# Altium footprint library Altium_Box_Header_MPC3.PcbLib: 235 footprints (part 1 of 15)
Each footprint in its own frame and in the unit in brackets; x right, y up, seen from the top. Pads: shape width x height; smd on the part's side, far side on the other; paste and mask are expansions set on the pad; w line width, h text height; cw(c..) or ccw(c..) is an arc to the next point about the centre after c.
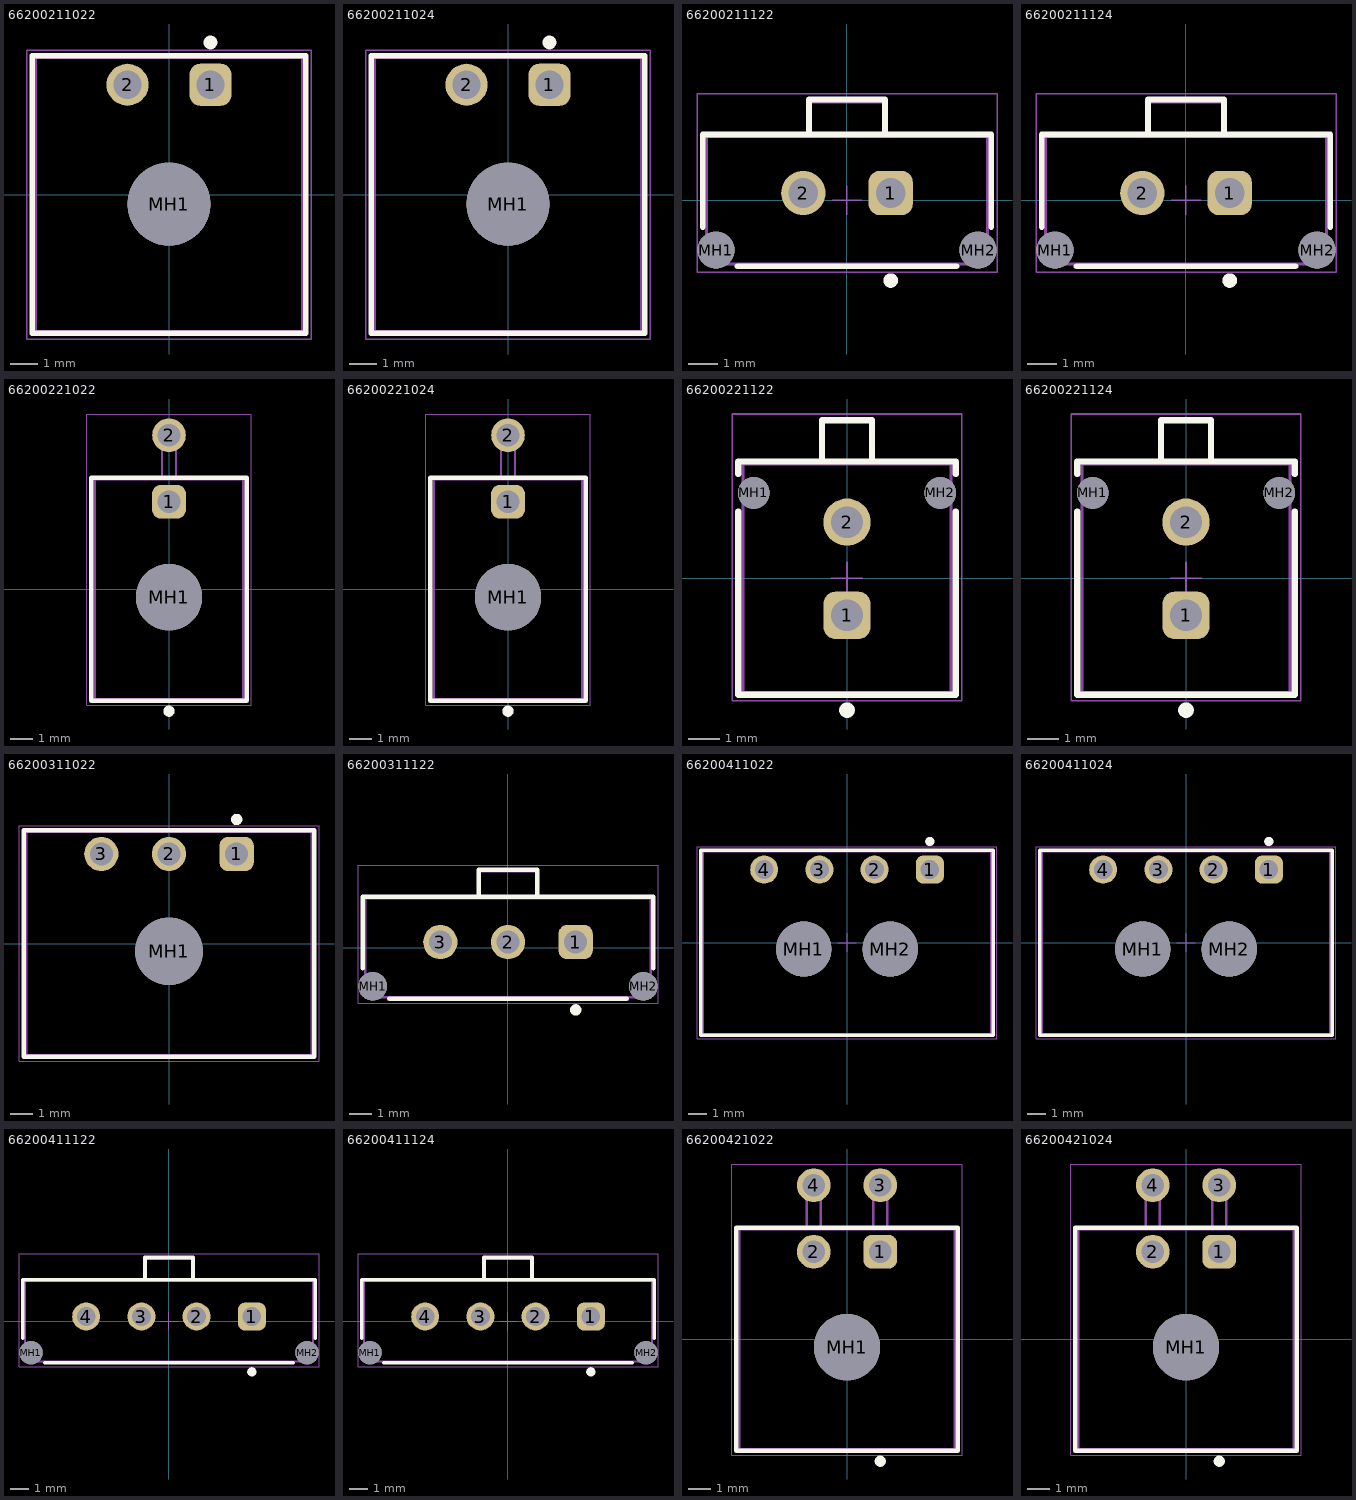
[diagram p0: the footprints below, top view; thin cyan lines are the x and y axes]

## 66200211022 [mm] "3.00mm Male Single Row Angled Header with Plastic Pegs, 2p"
height 5.07
pads (3):
  rrect50% 1.52x1.52 hole 1.02: 1(1.5,3.97)
  round 1.52 hole 1.02: 2(-1.5,3.97)
  round 3 hole 3 unplated: MH1(0,-0.35)
Top Overlay:
  circle w0.25: c1.5,5.5 r0.125
  lines w0.2: -4.95,-5.025 -4.95,5.025 4.95,5.025 4.95,-5.025 -4.95,-5.025
Top Designator:
  text ".Designator" at -7.498,-0.5 h1.5
Top Component Outline:
  lines w0.1: -4.825,-4.95 4.825,-4.95 4.825,4.95 -4.825,4.95 -4.825,-4.95
Top 3D Body:
  lines w0.1: -4.825,-4.95 4.825,-4.95 4.825,4.95 -4.825,4.95 -4.825,-4.95
Top Courtyard:
  lines w0.05: -5.15,-5.225 -5.15,5.225 5.15,5.225 5.15,-5.225 -5.15,-5.225
Top Component Center:
  lines w0.05: -0.5,0 0.5,0 ; 0,-0.5 0,0.5
3D body "66200211022.stp": height 5.6, standoff -3.16, extent -4.825,-4.95 4.825,4.95

## 66200211024 [mm] "3.00mm Male Single Row Angled Header with Plastic Pegs, 2p"
height 5.07
pads (3):
  rrect50% 1.52x1.52 hole 1.02: 1(1.5,3.97)
  round 1.52 hole 1.02: 2(-1.5,3.97)
  round 3 hole 3 unplated: MH1(0,-0.35)
Top Overlay:
  circle w0.25: c1.5,5.5 r0.125
  lines w0.2: -4.95,-5.025 -4.95,5.025 4.95,5.025 4.95,-5.025 -4.95,-5.025
Top Designator:
  text ".Designator" at -7.498,-0.5 h1.5
Top Component Outline:
  lines w0.1: -4.825,-4.95 4.825,-4.95 4.825,4.95 -4.825,4.95 -4.825,-4.95
Top 3D Body:
  lines w0.1: -4.825,-4.95 4.825,-4.95 4.825,4.95 -4.825,4.95 -4.825,-4.95
Top Courtyard:
  lines w0.05: -5.15,-5.225 -5.15,5.225 5.15,5.225 5.15,-5.225 -5.15,-5.225
Top Component Center:
  lines w0.05: -0.5,0 0.5,0 ; 0,-0.5 0,0.5
3D body "66200211024.stp": height 5.6, standoff -3.16, extent -4.825,-4.95 4.825,4.95

## 66200211122 [mm] "3.00mm Male Single Row Vertical Header, 2p"
height 11
pads (4):
  rrect50% 1.52x1.52 hole 1.02: 1(1.5,0.255)
  round 1.52 hole 1.02: 2(-1.5,0.255)
  round 1.27 hole 1.27 unplated: MH1(-4.5,-1.705) MH2(4.5,-1.705)
Top Overlay:
  circle w0.25: c1.5,-2.75 r0.125
  lines w0.2: -4.95,-0.91 -4.95,2.26 4.95,2.26 4.95,-0.91 ; -3.755,-2.26 3.755,-2.26 ; -1.3,2.26 -1.3,3.46 1.3,3.46 1.3,2.26
Top Designator:
  text ".Designator" at -7.498,-0.5 h1.5
Top Component Outline:
  lines w0.1: -1.3,2.185 -1.3,3.385 1.3,3.385 1.3,2.185 ; 4.825,-2.185 4.825,2.185 -4.825,2.185 -4.825,-2.185 4.83,-2.185
Top 3D Body:
  lines w0.1: -1.3,2.185 -1.3,3.385 1.3,3.385 1.3,2.185 ; 4.825,-2.185 4.825,2.185 -4.825,2.185 -4.825,-2.185 4.83,-2.185
Top Courtyard:
  lines w0.05: -5.15,-2.46 5.15,-2.46 5.15,3.66 -5.15,3.66 -5.15,-2.46
Top Component Center:
  lines w0.05: -0.5,0 0.5,0 ; 0,-0.5 0,0.5
3D body "66200211122.stp": height 9.93, standoff -3.15, extent -4.825,-2.185 4.825,3.385

## 66200211124 [mm] "3.00mm Male Single Row Vertical Header, 2p"
height 11
pads (4):
  rrect50% 1.52x1.52 hole 1.02: 1(1.5,0.255)
  round 1.52 hole 1.02: 2(-1.5,0.255)
  round 1.27 hole 1.27 unplated: MH1(-4.5,-1.705) MH2(4.5,-1.705)
Top Overlay:
  circle w0.25: c1.5,-2.75 r0.125
  lines w0.2: -4.95,-0.91 -4.95,2.26 4.95,2.26 4.95,-0.91 ; -3.755,-2.26 3.755,-2.26 ; -1.3,2.26 -1.3,3.46 1.3,3.46 1.3,2.26
Top Designator:
  text ".Designator" at -7.498,-0.5 h1.5
Top Component Outline:
  lines w0.1: -1.3,2.185 -1.3,3.385 1.3,3.385 1.3,2.185 ; 4.825,-2.185 4.825,2.185 -4.825,2.185 -4.825,-2.185 4.83,-2.185
Top 3D Body:
  lines w0.1: -1.3,2.185 -1.3,3.385 1.3,3.385 1.3,2.185 ; 4.825,-2.185 4.825,2.185 -4.825,2.185 -4.825,-2.185 4.83,-2.185
Top Courtyard:
  lines w0.05: -5.15,-2.46 5.15,-2.46 5.15,3.66 -5.15,3.66 -5.15,-2.46
Top Component Center:
  lines w0.05: -0.5,0 0.5,0 ; 0,-0.5 0,0.5
3D body "66200211124.stp": height 9.93, standoff -3.15, extent -4.825,-2.185 4.825,3.385

## 66200221022 [mm] "Dual row Right angle header With plastic peg 02p"
height 8.76
pads (3):
  rrect50% 1.52x1.52 hole 1.02: 1(0,3.95)
  round 1.52 hole 1.02: 2(0,6.95)
  round 3 hole 3 unplated: MH1(0,-0.35)
Top Overlay:
  circle w0.25: c0,-5.5 r0.125
  lines w0.2: -3.5,-5.025 -3.5,5.025 3.5,5.025 3.5,-5.025 -3.5,-5.025
Top Designator:
  text ".Designator" at -7.498,-0.5 h1.5
Top Component Outline:
  lines w0.1: -0.32,4.95 -0.32,7.27 0.32,7.27 0.32,4.95 ; -3.35,-4.95 3.35,-4.95 3.35,4.95 -3.35,4.95 -3.35,-4.95
Top 3D Body:
  lines w0.1: -0.32,4.95 -0.32,7.27 0.32,7.27 0.32,4.95 ; -3.35,-4.95 3.35,-4.95 3.35,4.95 -3.35,4.95 -3.35,-4.95
Top Courtyard:
  lines w0.05: -3.7,-5.225 -3.7,7.91 3.7,7.91 3.7,-5.225 -3.7,-5.225
Top Component Center:
  lines w0.05: -0.5,0 0.5,0 ; 0,-0.5 0,0.5
3D body "66200221022 (rev1).stp": height 8.79, standoff -3.17, extent -3.35,-4.95 3.35,7.27

## 66200221024 [mm] "Dual row Right angle header With plastic peg 02p"
height 8.76
pads (3):
  rrect50% 1.52x1.52 hole 1.02: 1(0,3.95)
  round 1.52 hole 1.02: 2(0,6.95)
  round 3 hole 3 unplated: MH1(0,-0.35)
Top Overlay:
  circle w0.25: c0,-5.5 r0.125
  lines w0.2: -3.5,-5.025 3.5,-5.025 3.5,5.025 -3.5,5.025 -3.5,-5.025
Top Designator:
  text ".Designator" at -7.498,-0.5 h1.5
Top Component Outline:
  lines w0.1: -0.32,4.95 -0.32,7.27 0.32,7.27 0.32,4.95 ; -3.35,-4.95 -3.35,4.95 3.35,4.95 3.35,-4.95 -3.35,-4.95
Top 3D Body:
  lines w0.1: -0.32,4.95 -0.32,7.27 0.32,7.27 0.32,4.95 ; -3.35,-4.95 -3.35,4.95 3.35,4.95 3.35,-4.95 -3.35,-4.95
Top Courtyard:
  lines w0.05: -3.7,-5.225 3.7,-5.225 3.7,7.91 -3.7,7.91 -3.7,-5.225
Top Component Center:
  lines w0.05: -0.5,0 0.5,0 ; 0,-0.5 0,0.5
3D body "66200221024.stp": height 8.78, standoff -3.18, extent -3.353,-4.95 3.353,7.271

## 66200221122 [mm] "Dual row Vertical header 02p"
height 9.9
pads (4):
  rrect50% 1.52x1.52 hole 1.02: 1(0,-1.2)
  round 1.52 hole 1.02: 2(0,1.8)
  round 1.02 hole 1.02 unplated: MH1(-3,2.74) MH2(3,2.74)
Top Overlay:
  circle w0.25: c0,-4.25 r0.125
  lines w0.2: -3.5,2.145 -3.5,-3.755 3.5,-3.755 3.5,2.145 ; -3.5,3.345 -3.5,3.755 3.5,3.755 3.5,3.345 ; -0.8,3.755 -0.8,5.08 0.8,5.08 0.8,3.755
Top Designator:
  text ".Designator" at -7.498,-0.5 h1.5
Top Component Outline:
  lines w0.1: -0.8,3.68 -0.8,5.08 0.8,5.08 0.8,3.68 ; -3.35,-3.68 3.35,-3.68 3.35,3.68 -3.35,3.68 -3.35,-3.68
Top 3D Body:
  lines w0.1: -0.8,3.68 -0.8,5.08 0.8,5.08 0.8,3.68 ; -3.35,-3.68 3.35,-3.68 3.35,3.68 -3.35,3.68 -3.35,-3.68
Top Courtyard:
  lines w0.05: -3.7,-3.955 3.7,-3.955 3.7,5.28 -3.7,5.28 -3.7,-3.955
Top Component Center:
  lines w0.05: -0.5,0 0.5,0 ; 0,-0.5 0,0.5
3D body "66200221122.stp": height 9.93, standoff -3.17, extent -3.35,-3.68 3.35,5.08

## 66200221124 [mm] "Dual row Vertical header 02p"
height 9.9
pads (4):
  rrect50% 1.52x1.52 hole 1.02: 1(0,-1.2)
  round 1.52 hole 1.02: 2(0,1.8)
  round 1.02 hole 1.02 unplated: MH1(-3,2.74) MH2(3,2.74)
Top Overlay:
  circle w0.25: c0,-4.25 r0.125
  lines w0.2: -3.5,2.145 -3.5,-3.755 3.5,-3.755 3.5,2.145 ; -3.5,3.345 -3.5,3.755 3.5,3.755 3.5,3.345 ; -0.8,3.755 -0.8,5.08 0.8,5.08 0.8,3.755
Top Designator:
  text ".Designator" at -7.498,-0.5 h1.5
Top Component Outline:
  lines w0.1: -0.8,3.68 -0.8,5.08 0.8,5.08 0.8,3.68 ; -3.35,-3.68 -3.35,3.68 3.35,3.68 3.35,-3.68 -3.35,-3.68
Top 3D Body:
  lines w0.1: -0.8,3.68 -0.8,5.08 0.8,5.08 0.8,3.68 ; -3.35,-3.68 -3.35,3.68 3.35,3.68 3.35,-3.68 -3.35,-3.68
Top Courtyard:
  lines w0.05: -3.7,-3.955 -3.7,5.28 3.7,5.28 3.7,-3.955 -3.7,-3.955
Top Component Center:
  lines w0.05: -0.5,0 0.5,0 ; 0,-0.5 0,0.5
3D body "66200221124.stp": height 9.93, standoff -3.17, extent -3.35,-3.68 3.35,5.08

## 66200311022 [mm] "3.00mm Male Single Row Angled Header with Plastic Pegs, 3p"
height 5.07
pads (4):
  rrect50% 1.52x1.52 hole 1.02: 1(3,3.97)
  round 1.52 hole 1.02: 2(0,3.97) 3(-3,3.97)
  round 3 hole 3 unplated: MH1(0,-0.35)
Top Overlay:
  circle w0.25: c3,5.5 r0.125
  lines w0.2: -6.45,-5.025 6.45,-5.025 6.45,5.025 -6.45,5.025 -6.45,-5.025
Top Designator:
  text ".Designator" at -7.498,-0.5 h1.5
Top Component Outline:
  lines w0.1: -6.325,-4.95 -6.325,4.95 6.325,4.95 6.325,-4.95 -6.325,-4.95
Top 3D Body:
  lines w0.1: -6.325,-4.95 -6.325,4.95 6.325,4.95 6.325,-4.95 -6.325,-4.95
Top Courtyard:
  lines w0.05: -6.65,-5.225 6.65,-5.225 6.65,5.225 -6.65,5.225 -6.65,-5.225
Top Component Center:
  lines w0.05: -0.5,0 0.5,0 ; 0,-0.5 0,0.5
3D body "66200311022.stp": height 5.6, standoff -3.16, extent -6.325,-4.95 6.325,4.95

## 66200311122 [mm] "3.00mm Male Single Row Vertical Header, 3p"
height 11
pads (5):
  rrect50% 1.52x1.52 hole 1.02: 1(3,0.255)
  round 1.52 hole 1.02: 2(0,0.255) 3(-3,0.255)
  round 1.27 hole 1.27 unplated: MH1(-6,-1.705) MH2(6,-1.705)
Top Overlay:
  circle w0.25: c3,-2.75 r0.125
  lines w0.2: -6.45,-0.91 -6.45,2.26 6.45,2.26 6.45,-0.91 ; -5.255,-2.26 5.255,-2.26 ; -1.3,2.26 -1.3,3.46 1.3,3.46 1.3,2.26
Top Designator:
  text ".Designator" at -7.498,-0.5 h1.5
Top Component Outline:
  lines w0.1: -1.3,2.185 -1.3,3.385 1.3,3.385 1.3,2.185 ; 6.325,-2.185 6.325,2.185 -6.325,2.185 -6.325,-2.185 6.33,-2.185
Top 3D Body:
  lines w0.1: -1.3,2.185 -1.3,3.385 1.3,3.385 1.3,2.185 ; 6.325,-2.185 6.325,2.185 -6.325,2.185 -6.325,-2.185 6.33,-2.185
Top Courtyard:
  lines w0.05: -6.65,-2.46 -6.65,3.66 6.65,3.66 6.65,-2.46 -6.65,-2.46
Top Component Center:
  lines w0.05: -0.5,0 0.5,0 ; 0,-0.5 0,0.5
3D body "66200311122.stp": height 9.93, standoff -3.15, extent -6.325,-2.185 6.325,3.385

## 66200411022 [mm] "3.00mm Male Single Row Angled Header with Plastic Pegs, 4p"
height 5.07
pads (6):
  rrect50% 1.52x1.52 hole 1.02: 1(4.5,3.97)
  round 1.52 hole 1.02: 2(1.5,3.97) 3(-1.5,3.97) 4(-4.5,3.97)
  round 3 hole 3 unplated: MH1(-2.35,-0.35) MH2(2.35,-0.35)
Top Overlay:
  circle w0.25: c4.5,5.5 r0.125
  lines w0.2: -7.95,-5.025 7.95,-5.025 7.95,5.025 -7.95,5.025 -7.95,-5.025
Top Designator:
  text ".Designator" at -7.498,-0.5 h1.5
Top Component Outline:
  lines w0.1: -7.825,-4.95 -7.825,4.95 7.825,4.95 7.825,-4.95 -7.825,-4.95
Top 3D Body:
  lines w0.1: -7.825,-4.95 -7.825,4.95 7.825,4.95 7.825,-4.95 -7.825,-4.95
Top Courtyard:
  lines w0.05: -8.15,-5.225 8.15,-5.225 8.15,5.225 -8.15,5.225 -8.15,-5.225
Top Component Center:
  lines w0.05: -0.5,0 0.5,0 ; 0,-0.5 0,0.5
3D body "66200411022.stp": height 5.6, standoff -3.16, extent -7.825,-4.95 7.825,4.95

## 66200411024 [mm] "3.00mm Male Single Row Angled Header with Plastic Pegs, 4p"
height 5.07
pads (6):
  rrect50% 1.52x1.52 hole 1.02: 1(4.5,3.97)
  round 1.52 hole 1.02: 2(1.5,3.97) 3(-1.5,3.97) 4(-4.5,3.97)
  round 3 hole 3 unplated: MH1(-2.35,-0.35) MH2(2.35,-0.35)
Top Overlay:
  circle w0.25: c4.5,5.5 r0.125
  lines w0.2: -7.95,-5.025 -7.95,5.025 7.95,5.025 7.95,-5.025 -7.95,-5.025
Top Designator:
  text ".Designator" at -7.498,-0.5 h1.5
Top Component Outline:
  lines w0.1: -7.825,-4.95 7.825,-4.95 7.825,4.95 -7.825,4.95 -7.825,-4.95
Top 3D Body:
  lines w0.1: -7.825,-4.95 7.825,-4.95 7.825,4.95 -7.825,4.95 -7.825,-4.95
Top Courtyard:
  lines w0.05: -8.15,-5.225 -8.15,5.225 8.15,5.225 8.15,-5.225 -8.15,-5.225
Top Component Center:
  lines w0.05: -0.5,0 0.5,0 ; 0,-0.5 0,0.5
3D body "66200411024.stp": height 5.6, standoff -3.16, extent -7.825,-4.95 7.825,4.95

## 66200411122 [mm] "3.00mm Male Single Row Vertical Header, 4p"
height 11
pads (6):
  rrect50% 1.52x1.52 hole 1.02: 1(4.5,0.255)
  round 1.52 hole 1.02: 2(1.5,0.255) 3(-1.5,0.255) 4(-4.5,0.255)
  round 1.27 hole 1.27 unplated: MH1(-7.5,-1.705) MH2(7.5,-1.705)
Top Overlay:
  circle w0.25: c4.5,-2.75 r0.125
  lines w0.2: -7.95,-0.91 -7.95,2.26 7.95,2.26 7.95,-0.91 ; -6.755,-2.26 6.755,-2.26 ; -1.3,2.26 -1.3,3.46 1.3,3.46 1.3,2.26
Top Designator:
  text ".Designator" at -7.498,-0.5 h1.5
Top Component Outline:
  lines w0.1: -1.3,2.185 -1.3,3.385 1.3,3.385 1.3,2.185 ; 7.825,-2.185 7.825,2.185 -7.825,2.185 -7.825,-2.185 7.83,-2.185
Top 3D Body:
  lines w0.1: -1.3,2.185 -1.3,3.385 1.3,3.385 1.3,2.185 ; 7.825,-2.185 7.825,2.185 -7.825,2.185 -7.825,-2.185 7.83,-2.185
Top Courtyard:
  lines w0.05: -8.15,-2.46 -8.15,3.66 8.15,3.66 8.15,-2.46 -8.15,-2.46
Top Component Center:
  lines w0.05: -0.5,0 0.5,0 ; 0,-0.5 0,0.5
3D body "66200411122.stp": height 9.93, standoff -3.15, extent -7.822,-2.185 7.828,3.385

## 66200411124 [mm] "3.00mm Male Single Row Vertical Header, 4p"
height 11
pads (6):
  rrect50% 1.52x1.52 hole 1.02: 1(4.5,0.255)
  round 1.52 hole 1.02: 2(1.5,0.255) 3(-1.5,0.255) 4(-4.5,0.255)
  round 1.27 hole 1.27 unplated: MH1(-7.5,-1.705) MH2(7.5,-1.705)
Top Overlay:
  circle w0.25: c4.5,-2.75 r0.125
  lines w0.2: -7.95,-0.91 -7.95,2.26 7.95,2.26 7.95,-0.91 ; -6.755,-2.26 6.755,-2.26 ; -1.3,2.26 -1.3,3.46 1.3,3.46 1.3,2.26
Top Designator:
  text ".Designator" at -7.498,-0.5 h1.5
Top Component Outline:
  lines w0.1: -1.3,2.185 -1.3,3.385 1.3,3.385 1.3,2.185 ; 7.825,-2.185 7.825,2.185 -7.825,2.185 -7.825,-2.185 7.83,-2.185
Top 3D Body:
  lines w0.1: -1.3,2.185 -1.3,3.385 1.3,3.385 1.3,2.185 ; 7.825,-2.185 7.825,2.185 -7.825,2.185 -7.825,-2.185 7.83,-2.185
Top Courtyard:
  lines w0.05: -8.15,-2.46 8.15,-2.46 8.15,3.66 -8.15,3.66 -8.15,-2.46
Top Component Center:
  lines w0.05: -0.5,0 0.5,0 ; 0,-0.5 0,0.5
3D body "66200411124.stp": height 9.93, standoff -3.15, extent -7.823,-2.185 7.827,3.385

## 66200421022 [mm] "Dual row Right angle header With plastic peg 04p"
height 8.76
pads (5):
  rrect50% 1.52x1.52 hole 1.02: 1(1.5,3.95)
  round 1.52 hole 1.02: 2(-1.5,3.95) 3(1.5,6.95) 4(-1.5,6.95)
  round 3 hole 3 unplated: MH1(0,-0.35)
Top Overlay:
  circle w0.25: c1.5,-5.5 r0.125
  lines w0.2: -5,-5.025 -5,5.025 5,5.025 5,-5.025 -5,-5.025
Top Designator:
  text ".Designator" at -7.498,-0.5 h1.5
Top Component Outline:
  lines w0.1: -1.82,4.95 -1.82,7.27 -1.18,7.27 -1.18,4.95 ; 1.18,4.95 1.18,7.27 1.82,7.27 1.82,4.95 ; -4.85,-4.95 4.85,-4.95 4.85,4.95 -4.85,4.95 -4.85,-4.95
Top 3D Body:
  lines w0.1: -1.82,4.95 -1.82,7.27 -1.18,7.27 -1.18,4.95 ; 1.18,4.95 1.18,7.27 1.82,7.27 1.82,4.95 ; -4.85,-4.95 4.85,-4.95 4.85,4.95 -4.85,4.95 -4.85,-4.95
Top Courtyard:
  lines w0.05: -5.2,-5.225 -5.2,7.91 5.2,7.91 5.2,-5.225 -5.2,-5.225
Top Component Center:
  lines w0.05: -0.5,0 0.5,0 ; 0,-0.5 0,0.5
3D body "62000421022.stp": height 8.79, standoff -3.17, extent -4.85,-4.95 4.85,7.27

## 66200421024 [mm] "Dual row Right angle header With plastic peg 04p"
height 8.76
pads (5):
  rrect50% 1.52x1.52 hole 1.02: 1(1.5,3.95)
  round 1.52 hole 1.02: 2(-1.5,3.95) 3(1.5,6.95) 4(-1.5,6.95)
  round 3 hole 3 unplated: MH1(0,-0.35)
Top Overlay:
  circle w0.25: c1.5,-5.5 r0.125
  lines w0.2: -5,-5.025 5,-5.025 5,5.025 -5,5.025 -5,-5.025
Top Designator:
  text ".Designator" at -7.498,-0.5 h1.5
Top Component Outline:
  lines w0.1: -1.82,4.95 -1.82,7.27 -1.18,7.27 -1.18,4.95 ; 1.18,4.95 1.18,7.27 1.82,7.27 1.82,4.95 ; -4.85,-4.95 -4.85,4.95 4.85,4.95 4.85,-4.95 -4.85,-4.95
Top 3D Body:
  lines w0.1: -1.82,4.95 -1.82,7.27 -1.18,7.27 -1.18,4.95 ; 1.18,4.95 1.18,7.27 1.82,7.27 1.82,4.95 ; -4.85,-4.95 -4.85,4.95 4.85,4.95 4.85,-4.95 -4.85,-4.95
Top Courtyard:
  lines w0.05: -5.2,-5.225 5.2,-5.225 5.2,7.91 -5.2,7.91 -5.2,-5.225
Top Component Center:
  lines w0.05: -0.5,0 0.5,0 ; 0,-0.5 0,0.5
3D body "66200421024.stp": height 8.78, standoff -3.18, extent -4.853,-4.95 4.853,7.271